# Altium schematic symbol library Schlib1.SchLib: 5 symbols
Pins are listed as number, name and electrical type; pins without a type are passive.

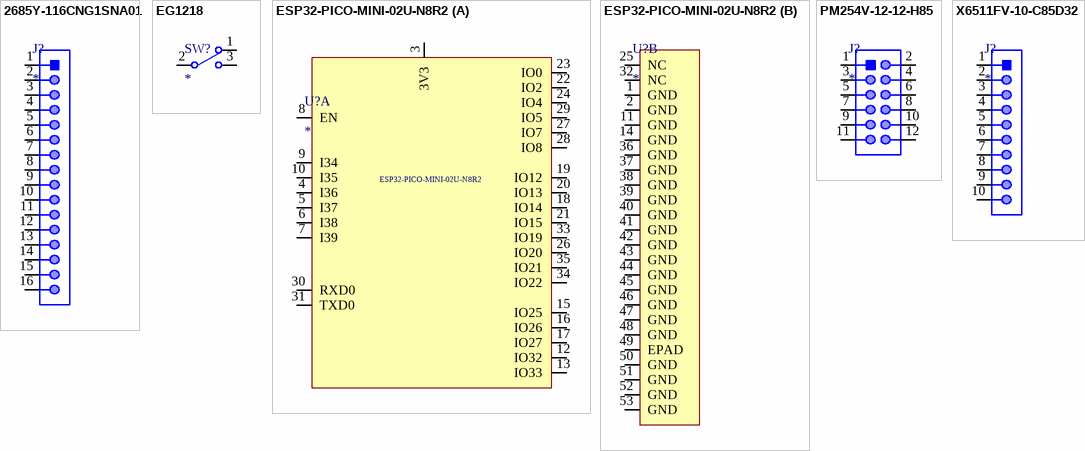
[diagram p0: symbols 2685Y-116CNG1SNA01 to X6511FV-10-C85D32]

## 2685Y-116CNG1SNA01
designator J?
2.54mm Plugin 16P Brass Straight 1x16P Plugin,P=2.54mm Female Headers ROHS; Manufacturer: HOAUC; Manufacturer Part Number: 2685Y-116CNG1SNA01; Item Type: Header; Package: Plugin,P=2.54mm; LCSC Part Number: C350305; ComponentLink1Description: LCSC; ComponentLink1URL: https://www.lcsc.com/product-detail/Female-Headers_HOAUC-2685Y-116CNG1SNA01_C350305.html
footprint HDR1X16 Female
pins: 1, 2, 3, 4, 5, 6, 7, 8, 9, 10, 11, 12, 13, 14, 15, 16

## EG1218
designator SW?
Switch Slide N.O./N.C. SPDT Top Slide 0.2A 30VDC PC Pins Thru-Hole; Manufacturer: E-Switch; Manufacturer Part Number: EG1218; Voltage Rating (DC): 30V; Electrical Life: 10000Cycles; Switch Travel: 2.5mm; Switch Function: On-On; Actuator Type: Standard; Contact Current Rating: 200mA; Operating Force: 250gf; Illumination Type: Non-Illuminated; Number of Positions: 2; Insulation Resistance: 100R; Contact Resistance: 20mR; Actuator Length: 2mm; Supplier 1: Digi-Key; RoHS: Yes; Category: Slide Switches; Stock 1: 57148; Pricing 1: 1=0.76, 10=0.727, 25=0.6996, 100=0.6071, 250=0.55396, 500=0.51478, 1000=0.46162, 2500=0.43364, 5000=0.40287 (USD); Mount: Through Hole; Number of Pins: 3; Contact Material: Copper Alloy,Copper,Silver; Contact Plating: Silver; Min Operating Temperature: -20°C; Max Operating Temperature: 70°C; Throw Configuration: SPDT; Termination: PC Pin; Packaging: Bulk; Orientation: Straight; Series: EG; Voltage Rating (AC): 30V; Voltage Rating: 30V; Lead Free: Lead Free; RoHS Compliant: Yes; Reach SVHC Compliant: No; ComponentLink1URL: https://datasheet.ciiva.com/1699/p040040c-1699451.pdf?src-supplier=Newark; ComponentLink1Description: https://datasheet.ciiva.com/1699/p040040c-1699451.pdf?src-supplier=Newark; Item Type: *; LCSC Part Number: C273394; Supplier Part Number 1: EG1903-ND
footprint EG1218
pins: 1 NC, 2 COM, 3 NO

## ESP32-PICO-MINI-02U-N8R2
designator U?
Rf Txrx Mod Bluetooth w.fl SMD; Manufacturer: Espressif Systems; Manufacturer Part Number: ESP32-PICO-MINI-02U-N8R2; Item Type: IC; Supplier 1: Digi-Key; RoHS: No; Category: Uncategorized; Stock 1: 2887; Pricing 1: 1=3.5 (USD); Supplier Part Number 1: 1965-ESP32-PICO-MINI-02U-N8R2CT-ND; LCSC Part Number: C3013939
part A pins: 3 3V3, 4 I36, 5 I37, 6 I38, 7 I39, 8 EN, 9 I34, 10 I35, 12 IO32, 13 IO33, 15 IO25, 16 IO26, 17 IO27, 18 IO14, 19 IO12, 20 IO13, 21 IO15, 22 IO2, 23 IO0, 24 IO4, 26 IO20, 27 IO7, 28 IO8, 29 IO5, 30 RXD0, 31 TXD0, 33 IO19, 34 IO22, 35 IO21
part B pins: 1 GND, 2 GND, 11 GND, 14 GND, 25 NC, 32 NC, 36 GND, 37 GND, 38 GND, 39 GND, 40 GND, 41 GND, 42 GND, 43 GND, 44 GND, 45 GND, 46 GND, 47 GND, 48 GND, 49 EPAD, 50 GND, 51 GND, 52 GND, 53 GND

## PM254V-12-12-H85
designator J?
2.54mm 2.54mm 双排 12P Brass Straight 2x6P Plugin,P=2.54mm Female Headers ROHS; Manufacturer: XFCN; Manufacturer Part Number: PM254V-12-12-H85; Item Type: Header; Package: Plugin,P=2.54mm; LCSC Part Number: C541855; ComponentLink1Description: LCSC; ComponentLink1URL: https://www.lcsc.com/product-detail/Female-Headers_XFCN-PM254V-12-12-H85_C541855.html
footprint HDR2X6 Female
pins: 1, 2, 3, 4, 5, 6, 7, 8, 9, 10, 11, 12

## X6511FV-10-C85D32
designator J?
2.54mm Plugin Gold 3A 10P Brass -40℃~+105℃ 250V 260℃ Straight 1x10P 8.5mm Top Square Holes Plugin,P=2.54mm Female Headers ROHS; Manufacturer: XKB Connectivity; Manufacturer Part Number: X6511FV-10-C85D32; Item Type: Header; Package: Plugin,P=2.54mm; LCSC Part Number: C718235; ComponentLink1Description: LCSC; ComponentLink1URL: https://www.lcsc.com/product-detail/Female-Headers_XKB-Connectivity-X6511FV-10-C85D32_C718235.html
footprint HDR1X10 Female
pins: 1, 2, 3, 4, 5, 6, 7, 8, 9, 10